# Altium schematic symbol library LDL112PV18R.SchLib: 1 symbol
Pins are listed as number, name and electrical type; pins without a type are passive.

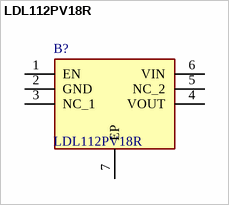
[diagram p0: symbol LDL112PV18R]

## LDL112PV18R
designator B?
1.2 A low quiescent current LDO with reverse current protection; Manufacturer_Name: STMicroelectronics; Geometry.Height: 1mm; Manufacturer_Part_Number: LDL112PV18R; Mouser Part Number: 511-LDL112PV18R; Mouser Price/Stock: https://www.mouser.co.uk/ProductDetail/STMicroelectronics/LDL112PV18R?qs=Ok1pvOkw6%2FrJNgvWv3vE3g%3D%3D; Arrow Part Number: LDL112PV18R; Arrow Price/Stock: https://www.arrow.com/en/products/ldl112pv18r/stmicroelectronics?region=nac; Datasheet Link: https://www.st.com/resource/en/datasheet/ldl112.pdf
footprint SON95P300X300X100-7N-D
pins: 1 EN, 2 GND, 3 NC_1, 4 VOUT, 5 NC_2, 6 VIN, 7 EP